# Altium schematic symbol library MC34063.SchLib: 1 symbol
Pins are listed as number, name and electrical type; pins without a type are passive.

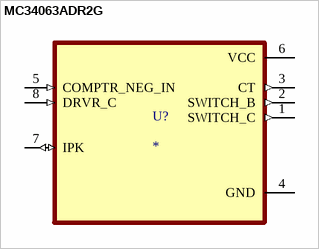
[diagram p0: symbol MC34063ADR2G]

## MC34063ADR2G
designator U?
Buck, Boost Switching Regulator IC Positive or Negative Adjustable 1.25V 1 Output 1.5A (Switch) 8-SOIC (0.154, 3.90mm Width); MF: ON Semiconductor; MP: MC34063ADR2G; SnapEDA_Link: https://www.snapeda.com/parts/MC34063ADR2G/Onsemi/view-part/?ref=snap; Package: SOIC-8 ON Semiconductor; Value: *; Check_prices: https://www.snapeda.com/parts/MC34063ADR2G/Onsemi/view-part/?ref=eda
footprint SOIC127P599X175-8N
pins: 1 SWITCH_C (out), 2 SWITCH_B (out), 3 CT (out), 4 GND (power), 5 COMPTR_NEG_IN (in), 6 VCC (power), 7 IPK (io), 8 DRVR_C (in)